# Altium footprint library bs_libs.PcbLib: 125 footprints (part 8 of 8)
Each footprint in its own frame and in the unit in brackets; x right, y up, seen from the top. Pads: shape width x height; smd on the part's side, far side on the other; paste and mask are expansions set on the pad; w line width, h text height; cw(c..) or ccw(c..) is an arc to the next point about the centre after c.
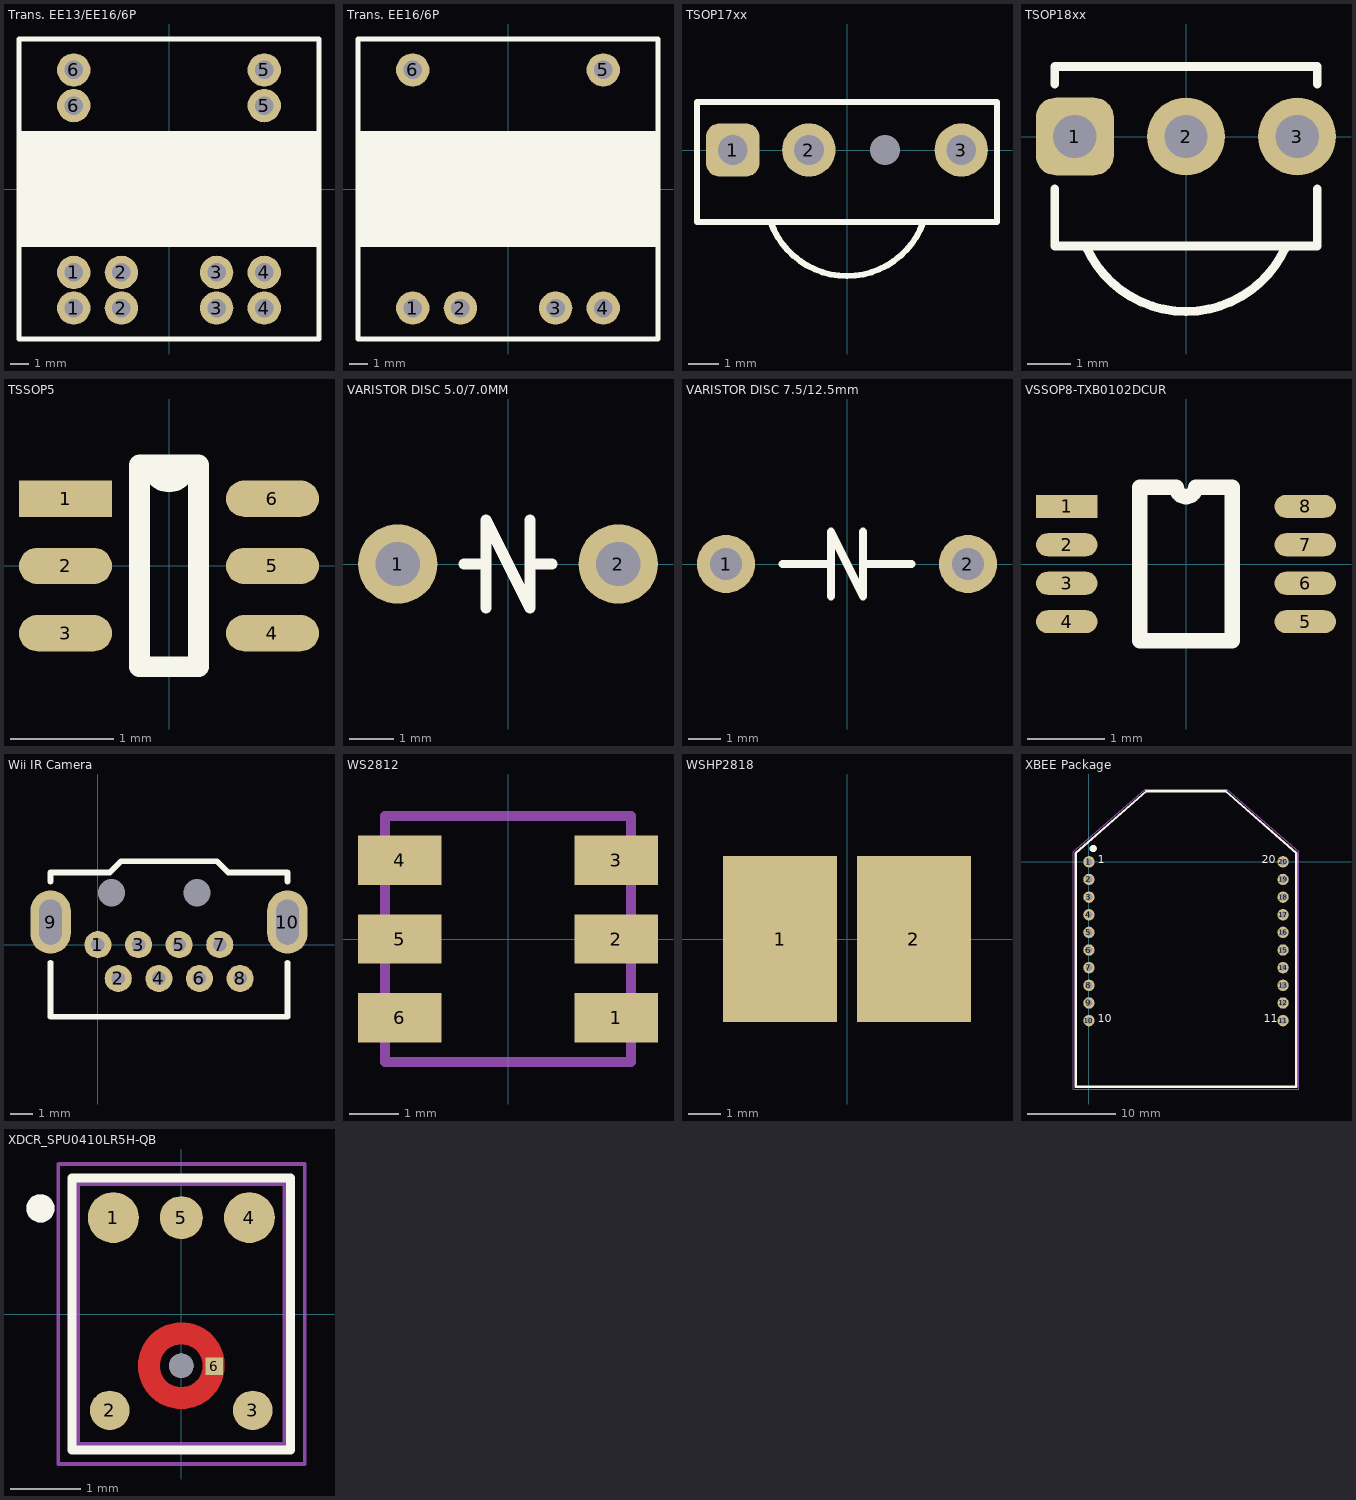
[diagram p7: the footprints below, top view; thin cyan lines are the x and y axes]

## Trans. EE13/EE16/6P [mil] "Tranformer EE16 6PIN"
pads (12):
  round 70 hole 39: 1(-200,-250) 1(-200,-175) 2(-100,-250) 2(-100,-175) 3(100,-250) 3(100,-175) 4(200,-250) 4(200,-175) 5(200,175) 5(200,250) 6(-200,175) 6(-200,250)
Top Overlay:
  rectangle: -314.96,-118.11 314.96,118.11
  lines w8: -314.96,-118.11 -314.96,118.11 314.96,118.11 314.96,-118.11 -314.96,-118.11
  lines w10: -314.96,-314.96 -314.96,314.96 314.96,314.96 314.96,-314.96 -314.96,-314.96
3D body: height 0, standoff -100, extent -113.88,-188.96 -86,-161.02
3D body: height 0, standoff -100, extent 86.12,-188.96 114.01,-161.02
3D body: height 0, standoff -100, extent 186.12,-188.96 214.01,-161.02
3D body: height 0, standoff -100, extent -213.88,-188.96 -185.99,-161.02
3D body: height 0, standoff -100, extent -213.88,161.04 -185.99,188.98
3D body: height 0, standoff -100, extent 186.12,161.04 214.01,188.98
3D body: height 100, standoff 0, extent -250,-250 250,250
3D body: height 500, standoff 0, extent -260,-100 260,100
3D body: height 400, standoff 100, extent -200,-200 200,200
3D body: height 450, standoff 400, extent -225,-225 225,225

## Trans. EE16/6P [mil] "Tranformer EE16 6PIN"
pads (6):
  round 70 hole 39: 1(-200,-250) 2(-100,-250) 3(100,-250) 4(200,-250) 5(200,250) 6(-200,250)
Top Overlay:
  rectangle: -314.96,-118.11 314.96,118.11
  lines w8: -314.96,-118.11 -314.96,118.11 314.96,118.11 314.96,-118.11 -314.96,-118.11
  lines w10: -314.96,-314.96 -314.96,314.96 314.96,314.96 314.96,-314.96 -314.96,-314.96
3D body: height 0, standoff -100, extent -213.88,-263.96 -185.99,-236.02
3D body: height 0, standoff -100, extent 186.12,236.04 214.01,263.98
3D body: height 0, standoff -100, extent -213.88,236.04 -185.99,263.98
3D body: height 0, standoff -100, extent 186.12,-263.96 214.01,-236.02
3D body: height 0, standoff -100, extent 86.12,-263.96 114.01,-236.02
3D body: height 0, standoff -100, extent -113.88,-263.96 -86,-236.02
3D body: height 100, standoff 0, extent -250,-250 250,250
3D body: height 500, standoff 0, extent -260,-100 260,100
3D body: height 400, standoff 100, extent -200,-200 200,200
3D body: height 450, standoff 400, extent -225,-225 225,225

## TSOP17xx [mil] "TSOP17xx IR receiver"
pads (4):
  rrect50% 70x70 hole 39: 1(-150,0)
  round 70 hole 39: 2(-50,0) 3(150,0)
  round 0 hole 39: NC(50,0)
Top Overlay:
  lines w8: -100.02,-95.06 ccw(c0,-59.06) 100.02,-95.06 ; -196.85,-94.49 -196.85,62.99 196.85,62.99 196.85,-94.49 -196.85,-94.49
3D body "User Library-tsop1738.step": height 512.13, standoff -692.6, extent -196.85,-165.35 196.85,62.99

## TSOP18xx [mil] "TSOP18xx IR receiver"
pads (3):
  rrect50% 70x70 hole 39: 1(-100,0)
  round 70 hole 39: 2(0,0) 3(100,0)
Top Overlay:
  lines w8: -118.11,-47.24 -118.11,-98.43 118.11,-98.43 118.11,-47.24 ; -118.11,47.24 -118.11,62.99 118.11,62.99 118.11,47.24 ; -90.26,-98.3 ccw(c0,-59.06) 90.26,-98.3
3D body "User Library-TSOP44xx-Right-IR reciver.step": height 326.81, standoff -189.15, extent -118.1,-155.35 118.12,151.17

## TSSOP5 [mm]
pads (6):
  rect 0.9x0.35 smd: 1(-1,0.65)
  oval 0.9x0.35 smd: 2(-1,0) 3(-1,-0.65) 4(1,-0.65) 5(1,0) 6(1,0.65)
Top Overlay:
  lines w0.2: -0.285,-0.975 -0.285,0.975 0.162,0.975 cw(c0,0.975) -0.162,0.975 0.285,0.975 0.285,-0.975 -0.285,-0.975
3D body "User Library-TSSOP-5 (SOT-23-5 PITCH 0_65).STEP": height 1.1, standoff -0.01, extent -1.125,-1.125 1.125,1.125

## VARISTOR DISC 5.0/7.0MM [mm] "VARISTOR 23V 250A DISC 7MM"
pads (2):
  round 1.8 hole 1: 1(-2.5,0) 2(2.5,0)
Top Overlay:
  lines w0.254: -1,0 -0.5,0 ; -0.5,-1 -0.5,1 0.5,-1 0.5,1 ; 0.5,0 1,0
3D body "User Library-Warystor_5mm.step": height 11, standoff -1.57, extent -4,-1.26 4,1.25

## VARISTOR DISC 7.5/12.5mm [mm] "VARISTOR 23V 250A DISC 7MM"
pads (2):
  round 1.8 hole 1: 1(-3.75,0) 2(3.75,0)
Top Overlay:
  lines w0.254: -2,0 -0.5,0 ; -0.5,-1 -0.5,1 0.5,-1 0.5,1 ; 0.5,0 2,0
3D body "MOV-10D561K.step": height 11, standoff -4.5, extent -5.5,-1.695 5.5,1.715

## VSSOP8-TXB0102DCUR [mm]
pads (8):
  rect 0.8x0.3 smd: 1(-1.55,0.75)
  oval 0.8x0.3 smd: 2(-1.55,0.25) 3(-1.55,-0.25) 4(-1.55,-0.75) 5(1.55,-0.75) 6(1.55,-0.25) 7(1.55,0.25) 8(1.55,0.75)
Top Overlay:
  lines w0.2: -0.6,-1 0.6,-1 0.6,1 0.125,1 cw(c0,1) -0.125,1 -0.6,1 -0.6,-1
3D body "User Library-SOP50P310X90-8N[8US8_VSSOP_DCU_MO-187CA].step": height 0.9, standoff 0, extent -1.6,-1.05 1.6,1.05

## Wii IR Camera [mm]
pads (12):
  round 1.2 hole 0.6: 1(0,0) 2(0.9,-1.5) 3(1.8,0) 4(2.7,-1.5) 5(3.6,0) 6(4.5,-1.5) 7(5.4,0) 8(6.3,-1.5)
  oval 1.8x2.8 hole 1 slot 2 at 90 deg: 9(-2.1,1) 10(8.4,1)
  round 0 hole 1.2: H1(0.6,2.3) H2(4.4,2.3)
Top Overlay:
  lines w0.254: -2.1,-0.8 -2.1,-3.2 8.4,-3.2 8.4,-0.8 ; -2.1,2.8 -2.1,3.2 0.525,3.2 1.025,3.7 5.275,3.7 5.775,3.2 8.4,3.2 8.4,2.8

## WS2812 [mm] "SK6812"
pads (6):
  rect 1.7x1 smd: 1(2.2,-1.6) 2(2.2,0) 3(2.2,1.6) 4(-2.2,1.6) 5(-2.2,0) 6(-2.2,-1.6)
Mechanical 1:
  lines w0.203: -2.5,-2.5 -2.5,2.5 2.5,2.5 2.5,-2.5 -2.5,-2.5
3D body "User Library-ws2812B-2.step": height 1.55, standoff -0.02, extent -2.7,-2.5 2.7,2.5

## WSHP2818 [mm]
pads (2):
  rect 3.5x5.1 smd: 1(-2.055,0) 2(2.055,0)
3D body "WSHP2818.stp": height 1.35, standoff -0.15, extent -3.55,0 3.55,4.6
3D body: height 1.5, standoff 0, extent -3.55,-2.3 3.55,2.3
3D body: height 1.5, standoff 0, extent -3.55,-2.3 3.55,2.3
3D body: height 1.5, standoff 0, extent -1.25,-1.2 1.525,1.275

## XBEE Package [mil]
pads (20):
  round 51 hole 31: 1(0,0) 2(0,-78.74) 3(0,-157.48) 4(0,-236.22) 5(0,-314.96) 6(0,-393.7) 7(0,-472.44) 8(0,-551.18) 9(0,-629.92) 10(0,-708.66) 11(866.14,-708.66) 12(866.14,-629.92) 13(866.14,-551.18) 14(866.14,-472.44) 15(866.14,-393.7) 16(866.14,-314.96) 17(866.14,-236.22) 18(866.14,-157.48) 19(866.14,-78.74) 20(866.14,0)
Top Overlay:
  circle w15: c18.76,59.06 r8.8
  lines w10: -59.06,-1003.94 -59.06,39.37 255.91,314.96 610.24,314.96 925.2,39.37 925.2,-1003.94 -59.06,-1003.94
  text "1" at 39.37,-19.68 h60
  text "10" at 39.37,-728.35 h60
  text "11" at 779.53,-728.35 h60
  text "20" at 771.65,-19.68 h60
Mechanical 1:
  lines w2: -68.9,-1013.78 -68.9,44.05 251.97,324.8 614.17,324.8 935.04,44.05 935.04,-1013.78 -68.9,-1013.78

## XDCR_SPU0410LR5H-QB [mm]
pads (7):
  round 0.723 smd: 1(-0.966,1.369) 4(0.966,1.369)
  round 0.562 smd: 2(-1.015,-1.369) 3(1.015,-1.369)
  round 0.612 smd: 5(0,1.369)
  rect 0.25x0.25 smd paste-1 mask+0: 6(0.47,-0.74)
  round 0.35 hole 0.35 unplated: ""(0,-0.734)
Top Layer:
  region: 248 vertices and 0 holes, not listed, extent -0.612,-1.346 0.612,-0.122
Top Overlay:
  circle w0.2: c-2,1.5 r0.1
  lines w0.127: -1.55,-1.93 1.55,-1.93 1.55,1.93 -1.55,1.93 -1.55,-1.93
Top Paste:
  drawing of 4 lines, arcs and shapes, not listed
Top Solder:
  circle w0.32: c0,-0.734 r0.459
Mechanical 13:
  circle w0.2: c-2,1.5 r0.1
  lines w0.127: -1.5,-1.88 -1.5,1.88 1.5,1.88 1.5,-1.88 -1.5,-1.88
Mechanical 15:
  lines w0.05: -1.75,-2.13 -1.75,2.13 1.75,2.13 1.75,-2.13 -1.75,-2.13
3D body "AM4311T42A0.step": height 1.1, standoff -0.05, extent -1.475,-1.88 1.475,1.88